# Altium integrated library Ceramic Capacitor 100nF 0805.IntLib: 1 symbol
Pins are listed as number, name and electrical type; pins without a type are passive.

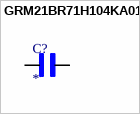
[diagram p0: symbol GRM21BR71H104KA01L]

## GRM21BR71H104KA01L
designator C?
Конденсатор SMD X7R(EIA) с ёмкостью: 0,10 мкФ ± 10%. Номинальное напряжение: 50 В постоянного тока; MF: Murata; MP: GRM21BR71H104KA01L; SnapEDA_Link: https://www.snapeda.com/parts/GRM21BR71H104KA01L/Murata/view-part/?ref=snap; Package: 805-2 Murata; Value: *; Check_prices: https://www.snapeda.com/parts/GRM21BR71H104KA01L/Murata/view-part/?ref=eda
footprint CAPC2012X135N
pins: 1, 2